# Altium integrated library 7M25090002.IntLib: 1 symbol
Pins are listed as number, name and electrical type; pins without a type are passive.

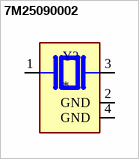
[diagram p0: symbol 7M25090002]

## 7M25090002
designator Y?
25 MHz Â±10ppm Crystal 18pF 4-SMD, No Lead; MF: TXC; MP: 7M25090002; SnapEDA_Link: https://www.snapeda.com/parts/7M25090002/TXC/view-part/?ref=snap; Package: NON STANDARD-4 TXC; Value: *; Check_prices: https://www.snapeda.com/parts/7M25090002/TXC/view-part/?ref=eda
footprint XTAL_7M25090002
pins: 1, 2 GND (power), 3 2, 4 GND (power)